# Altium footprint library Terminal_Blocks_Pluggable PCB_5.08mm.PcbLib: 299 footprints (part 19 of 19)
Each footprint in its own frame and in the unit in brackets; x right, y up, seen from the top. Pads: shape width x height; smd on the part's side, far side on the other; paste and mask are expansions set on the pad; w line width, h text height; cw(c..) or ccw(c..) is an arc to the next point about the centre after c.
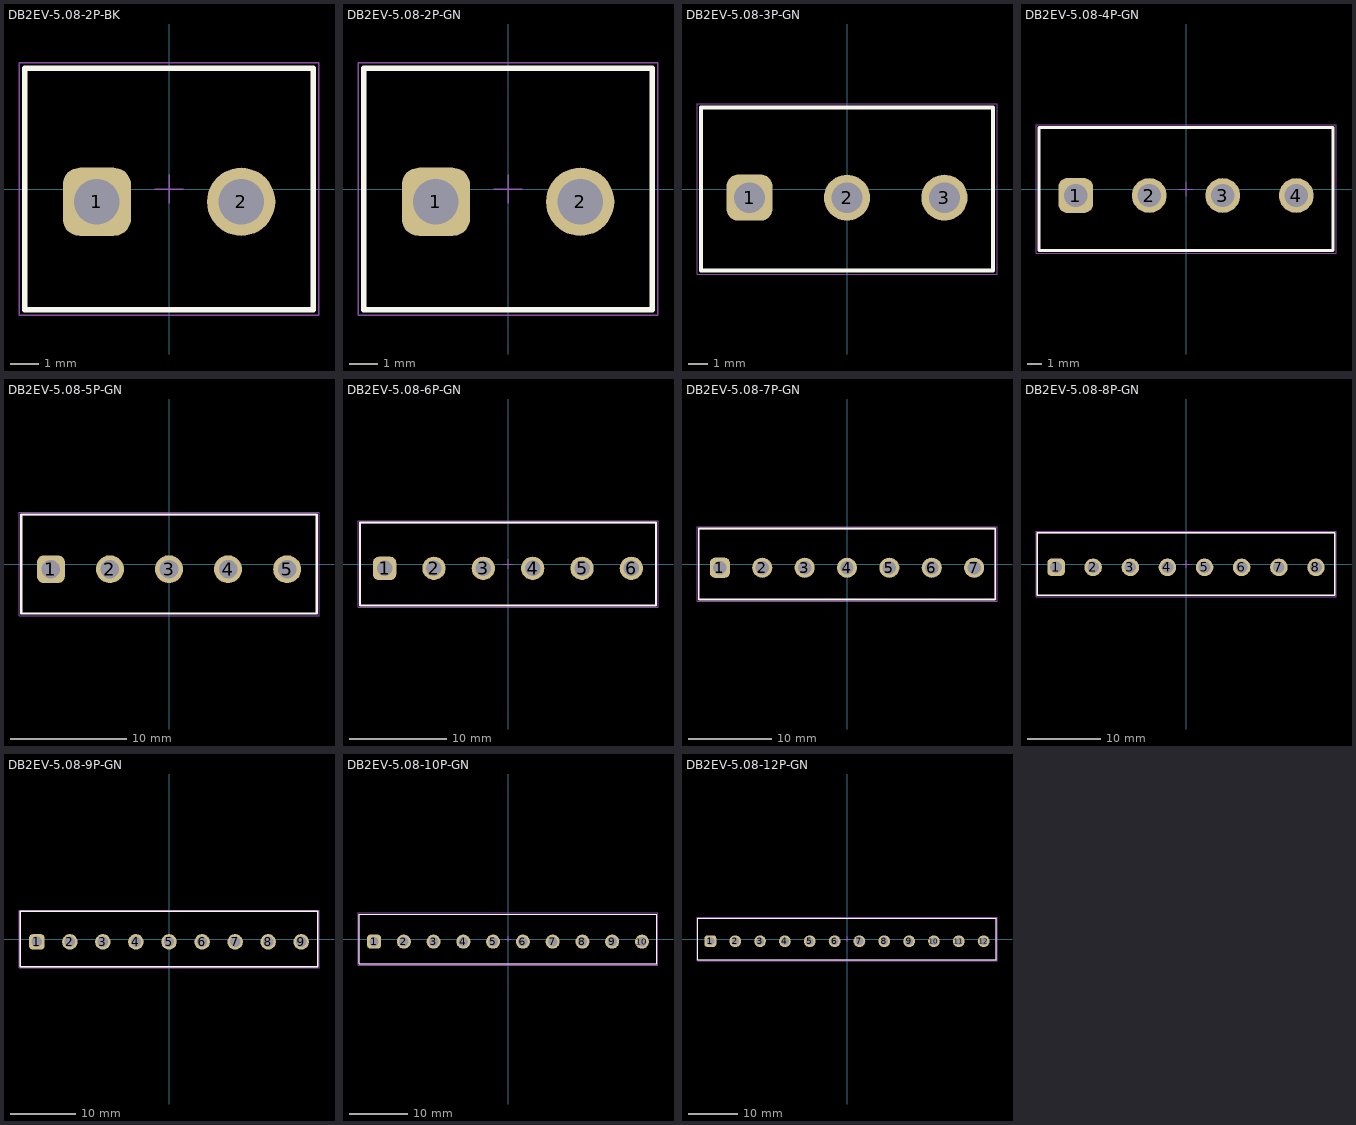
[diagram p18: the footprints below, top view; thin cyan lines are the x and y axes]

## DB2EV-5.08-2P-BK [mm] "5,08mm - PCB Headers - Vertical - Opened ends -02p"
height 12
pads (2):
  rrect50% 2.4x2.4 hole 1.6: 1(-2.54,-0.45)
  round 2.4 hole 1.6: 2(2.54,-0.45)
Top Overlay:
  lines w0.2: -5.08,-4.25 5.08,-4.25 5.08,4.25 -5.08,4.25 -5.08,-4.25
Top Designator:
  text ".Designator" at -7.498,-0.5 h1.5
Top Component Outline:
  lines w0.1: -5.08,-4.25 -5.08,4.25 5.08,4.25 5.08,-4.25 -5.08,-4.25
Top 3D Body:
  lines w0.1: -5.08,-4.25 5.08,-4.25 5.08,4.25 -5.08,4.25 -5.08,-4.25
Top Courtyard:
  lines w0.05: -5.28,-4.45 5.28,-4.45 5.28,4.45 -5.28,4.45 -5.28,-4.45
Top Component Center:
  lines w0.05: -0.5,0 0.5,0 ; 0,-0.5 0,0.5
3D body "db2ev-508-2p.step": height 12.05, standoff -3.65, extent -5.08,-4.3 5.08,4.2

## DB2EV-5.08-2P-GN [mm] "5,08mm - PCB Headers - Vertical - Opened ends -02p"
height 12
pads (2):
  rrect50% 2.4x2.4 hole 1.6: 1(-2.54,-0.45)
  round 2.4 hole 1.6: 2(2.54,-0.45)
Top Overlay:
  lines w0.2: -5.08,-4.25 -5.08,4.25 5.08,4.25 5.08,-4.25 -5.08,-4.25
Top Designator:
  text ".Designator" at -7.498,-0.5 h1.5
Top Component Outline:
  lines w0.1: -5.08,-4.25 5.08,-4.25 5.08,4.25 -5.08,4.25 -5.08,-4.25
Top 3D Body:
  lines w0.1: -5.08,-4.25 -5.08,4.25 5.08,4.25 5.08,-4.25 -5.08,-4.25
Top Courtyard:
  lines w0.05: -5.28,-4.45 -5.28,4.45 5.28,4.45 5.28,-4.45 -5.28,-4.45
Top Component Center:
  lines w0.05: -0.5,0 0.5,0 ; 0,-0.5 0,0.5
3D body "691311500002.stp": height 12.05, standoff -3.95, extent -5.08,-4.25 5.08,4.25

## DB2EV-5.08-3P-GN [mm] "5,08mm - PCB Headers - Vertical - Opened ends -03p"
height 12
pads (3):
  rrect50% 2.4x2.4 hole 1.6: 1(-5.08,-0.45)
  round 2.4 hole 1.6: 2(0,-0.45) 3(5.08,-0.45)
Top Overlay:
  lines w0.2: -7.62,-4.25 -7.62,4.25 7.62,4.25 7.62,-4.25 -7.62,-4.25
Top Designator:
  text ".Designator" at -7.498,-0.5 h1.5
Top Component Outline:
  lines w0.1: -7.62,-4.25 7.62,-4.25 7.62,4.25 -7.62,4.25 -7.62,-4.25
Top 3D Body:
  lines w0.1: -7.62,-4.25 -7.62,4.25 7.62,4.25 7.62,-4.25 -7.62,-4.25
Top Courtyard:
  lines w0.05: -7.82,-4.45 -7.82,4.45 7.82,4.45 7.82,-4.45 -7.82,-4.45
Top Component Center:
  lines w0.05: -0.5,0 0.5,0 ; 0,-0.5 0,0.5
3D body "691311500003.stp": height 12.05, standoff -3.95, extent -7.62,-4.25 7.62,4.25

## DB2EV-5.08-4P-GN [mm] "5,08mm - PCB Headers - Vertical - Opened ends -04p"
height 12
pads (4):
  rrect50% 2.4x2.4 hole 1.6: 1(-7.62,-0.45)
  round 2.4 hole 1.6: 2(-2.54,-0.45) 3(2.54,-0.45) 4(7.62,-0.45)
Top Overlay:
  lines w0.2: -10.16,-4.25 -10.16,4.25 10.16,4.25 10.16,-4.25 -10.16,-4.25
Top Designator:
  text ".Designator" at -7.498,-0.5 h1.5
Top Component Outline:
  lines w0.1: -10.16,-4.25 10.16,-4.25 10.16,4.25 -10.16,4.25 -10.16,-4.25
Top 3D Body:
  lines w0.1: -10.16,-4.25 -10.16,4.25 10.16,4.25 10.16,-4.25 -10.16,-4.25
Top Courtyard:
  lines w0.05: -10.36,-4.45 -10.36,4.45 10.36,4.45 10.36,-4.45 -10.36,-4.45
Top Component Center:
  lines w0.05: -0.5,0 0.5,0 ; 0,-0.5 0,0.5
3D body "691311500004.stp": height 12.05, standoff -3.95, extent -10.16,-4.25 10.16,4.25

## DB2EV-5.08-5P-GN [mm] "5,08mm - PCB Headers - Vertical - Opened ends -05p"
height 12
pads (5):
  rrect50% 2.4x2.4 hole 1.6: 1(-10.16,-0.45)
  round 2.4 hole 1.6: 2(-5.08,-0.45) 3(0,-0.45) 4(5.08,-0.45) 5(10.16,-0.45)
Top Overlay:
  lines w0.2: -12.7,-4.25 12.7,-4.25 12.7,4.25 -12.7,4.25 -12.7,-4.25
Top Designator:
  text ".Designator" at -7.498,-0.5 h1.5
Top Component Outline:
  lines w0.1: -12.7,-4.25 -12.7,4.25 12.7,4.25 12.7,-4.25 -12.7,-4.25
Top 3D Body:
  lines w0.1: -12.7,-4.25 12.7,-4.25 12.7,4.25 -12.7,4.25 -12.7,-4.25
Top Courtyard:
  lines w0.05: -12.9,-4.45 12.9,-4.45 12.9,4.45 -12.9,4.45 -12.9,-4.45
Top Component Center:
  lines w0.05: -0.5,0 0.5,0 ; 0,-0.5 0,0.5
3D body "691311500005.stp": height 12.05, standoff -3.95, extent -12.7,-4.25 12.7,4.25

## DB2EV-5.08-6P-GN [mm] "5,08mm - PCB Headers - Vertical - Opened ends -06p"
height 12
pads (6):
  rrect50% 2.4x2.4 hole 1.6: 1(-12.7,-0.45)
  round 2.4 hole 1.6: 2(-7.62,-0.45) 3(-2.54,-0.45) 4(2.54,-0.45) 5(7.62,-0.45) 6(12.7,-0.45)
Top Overlay:
  lines w0.2: -15.24,-4.25 15.24,-4.25 15.24,4.25 -15.24,4.25 -15.24,-4.25
Top Designator:
  text ".Designator" at -7.498,-0.5 h1.5
Top Component Outline:
  lines w0.1: -15.24,-4.25 -15.24,4.25 15.24,4.25 15.24,-4.25 -15.24,-4.25
Top 3D Body:
  lines w0.1: -15.24,-4.25 15.24,-4.25 15.24,4.25 -15.24,4.25 -15.24,-4.25
Top Courtyard:
  lines w0.05: -15.44,-4.45 15.44,-4.45 15.44,4.45 -15.44,4.45 -15.44,-4.45
Top Component Center:
  lines w0.05: -0.5,0 0.5,0 ; 0,-0.5 0,0.5
3D body "691311500006.stp": height 12.05, standoff -3.95, extent -15.24,-4.25 15.24,4.25

## DB2EV-5.08-7P-GN [mm] "5,08mm - PCB Headers - Vertical - Opened ends -07p"
height 12
pads (7):
  rrect50% 2.4x2.4 hole 1.6: 1(-15.24,-0.45)
  round 2.4 hole 1.6: 2(-10.16,-0.45) 3(-5.08,-0.45) 4(0,-0.45) 5(5.08,-0.45) 6(10.16,-0.45) 7(15.24,-0.45)
Top Overlay:
  lines w0.2: -17.78,-4.25 17.78,-4.25 17.78,4.25 -17.78,4.25 -17.78,-4.25
Top Designator:
  text ".Designator" at -7.498,-0.5 h1.5
Top Component Outline:
  lines w0.1: -17.78,-4.25 -17.78,4.25 17.78,4.25 17.78,-4.25 -17.78,-4.25
Top 3D Body:
  lines w0.1: -17.78,-4.25 17.78,-4.25 17.78,4.25 -17.78,4.25 -17.78,-4.25
Top Courtyard:
  lines w0.05: -17.98,-4.45 17.98,-4.45 17.98,4.45 -17.98,4.45 -17.98,-4.45
Top Component Center:
  lines w0.05: -0.5,0 0.5,0 ; 0,-0.5 0,0.5
3D body "691311500007.stp": height 12.05, standoff -3.95, extent -17.78,-4.25 17.78,4.25

## DB2EV-5.08-8P-GN [mm] "5,08mm - PCB Headers - Vertical - Opened ends -08p"
height 12
pads (8):
  rrect50% 2.4x2.4 hole 1.6: 1(-17.78,-0.45)
  round 2.4 hole 1.6: 2(-12.7,-0.45) 3(-7.62,-0.45) 4(-2.54,-0.45) 5(2.54,-0.45) 6(7.62,-0.45) 7(12.7,-0.45) 8(17.78,-0.45)
Top Overlay:
  lines w0.2: -20.32,-4.25 -20.32,4.25 20.32,4.25 20.32,-4.25 -20.32,-4.25
Top Designator:
  text ".Designator" at -7.498,-0.5 h1.5
Top Component Outline:
  lines w0.1: -20.32,-4.25 20.32,-4.25 20.32,4.25 -20.32,4.25 -20.32,-4.25
Top 3D Body:
  lines w0.1: -20.32,-4.25 -20.32,4.25 20.32,4.25 20.32,-4.25 -20.32,-4.25
Top Courtyard:
  lines w0.05: -20.52,-4.45 -20.52,4.45 20.52,4.45 20.52,-4.45 -20.52,-4.45
Top Component Center:
  lines w0.05: -0.5,0 0.5,0 ; 0,-0.5 0,0.5
3D body "691311500008.stp": height 12.05, standoff -3.95, extent -20.32,-4.25 20.32,4.25

## DB2EV-5.08-9P-GN [mm] "5,08mm - PCB Headers - Vertical - Opened ends -09p"
height 12
pads (9):
  rrect50% 2.4x2.4 hole 1.6: 1(-20.32,-0.45)
  round 2.4 hole 1.6: 2(-15.24,-0.45) 3(-10.16,-0.45) 4(-5.08,-0.45) 5(0,-0.45) 6(5.08,-0.45) 7(10.16,-0.45) 8(15.24,-0.45) 9(20.32,-0.45)
Top Overlay:
  lines w0.2: -22.86,-4.25 -22.86,4.25 22.86,4.25 22.86,-4.25 -22.86,-4.25
Top Designator:
  text ".Designator" at -7.498,-0.5 h1.5
Top Component Outline:
  lines w0.1: -22.86,-4.25 22.86,-4.25 22.86,4.25 -22.86,4.25 -22.86,-4.25
Top 3D Body:
  lines w0.1: -22.86,-4.25 -22.86,4.25 22.86,4.25 22.86,-4.25 -22.86,-4.25
Top Courtyard:
  lines w0.05: -23.06,-4.45 -23.06,4.45 23.06,4.45 23.06,-4.45 -23.06,-4.45
Top Component Center:
  lines w0.05: -0.5,0 0.5,0 ; 0,-0.5 0,0.5
3D body "691311500009.stp": height 12.05, standoff -3.95, extent -22.86,-4.25 22.86,4.25

## DB2EV-5.08-10P-GN [mm] "5,08mm - PCB Headers - Vertical - Opened ends -10p"
height 12
pads (10):
  rrect50% 2.4x2.4 hole 1.6: 1(-22.86,-0.45)
  round 2.4 hole 1.6: 2(-17.78,-0.45) 3(-12.7,-0.45) 4(-7.62,-0.45) 5(-2.54,-0.45) 6(2.54,-0.45) 7(7.62,-0.45) 8(12.7,-0.45) 9(17.78,-0.45) 10(22.86,-0.45)
Top Overlay:
  lines w0.2: -25.4,-4.25 25.4,-4.25 25.4,4.25 -25.4,4.25 -25.4,-4.25
Top Designator:
  text ".Designator" at -7.498,-0.5 h1.5
Top Component Outline:
  lines w0.1: -25.4,-4.25 -25.4,4.25 25.4,4.25 25.4,-4.25 -25.4,-4.25
Top 3D Body:
  lines w0.1: -25.4,-4.25 25.4,-4.25 25.4,4.25 -25.4,4.25 -25.4,-4.25
Top Courtyard:
  lines w0.05: -25.6,-4.45 25.6,-4.45 25.6,4.45 -25.6,4.45 -25.6,-4.45
Top Component Center:
  lines w0.05: -0.5,0 0.5,0 ; 0,-0.5 0,0.5
3D body "691311500010.stp": height 12.05, standoff -3.95, extent -25.4,-4.25 25.4,4.25

## DB2EV-5.08-12P-GN [mm] "5,08mm - PCB Headers - Vertical - Opened ends -12p"
height 12
pads (12):
  rrect50% 2.4x2.4 hole 1.6: 1(-27.94,-0.45)
  round 2.4 hole 1.6: 2(-22.86,-0.45) 3(-17.78,-0.45) 4(-12.7,-0.45) 5(-7.62,-0.45) 6(-2.54,-0.45) 7(2.54,-0.45) 8(7.62,-0.45) 9(12.7,-0.45) 10(17.78,-0.45) 11(22.86,-0.45) 12(27.94,-0.45)
Top Overlay:
  lines w0.2: -30.48,-4.25 30.48,-4.25 30.48,4.25 -30.48,4.25 -30.48,-4.25
Top Designator:
  text ".Designator" at -7.498,-0.5 h1.5
Top Component Outline:
  lines w0.1: -30.48,-4.25 -30.48,4.25 30.48,4.25 30.48,-4.25 -30.48,-4.25
Top 3D Body:
  lines w0.1: -30.48,-4.25 30.48,-4.25 30.48,4.25 -30.48,4.25 -30.48,-4.25
Top Courtyard:
  lines w0.05: -30.68,-4.45 30.68,-4.45 30.68,4.45 -30.68,4.45 -30.68,-4.45
Top Component Center:
  lines w0.05: -0.5,0 0.5,0 ; 0,-0.5 0,0.5
3D body "691311500012.stp": height 12.05, standoff -3.95, extent -30.48,-4.25 30.48,4.25